# Altium integrated library Altium_PCB_Connector.IntLib: 246 symbols (part 3 of 5)
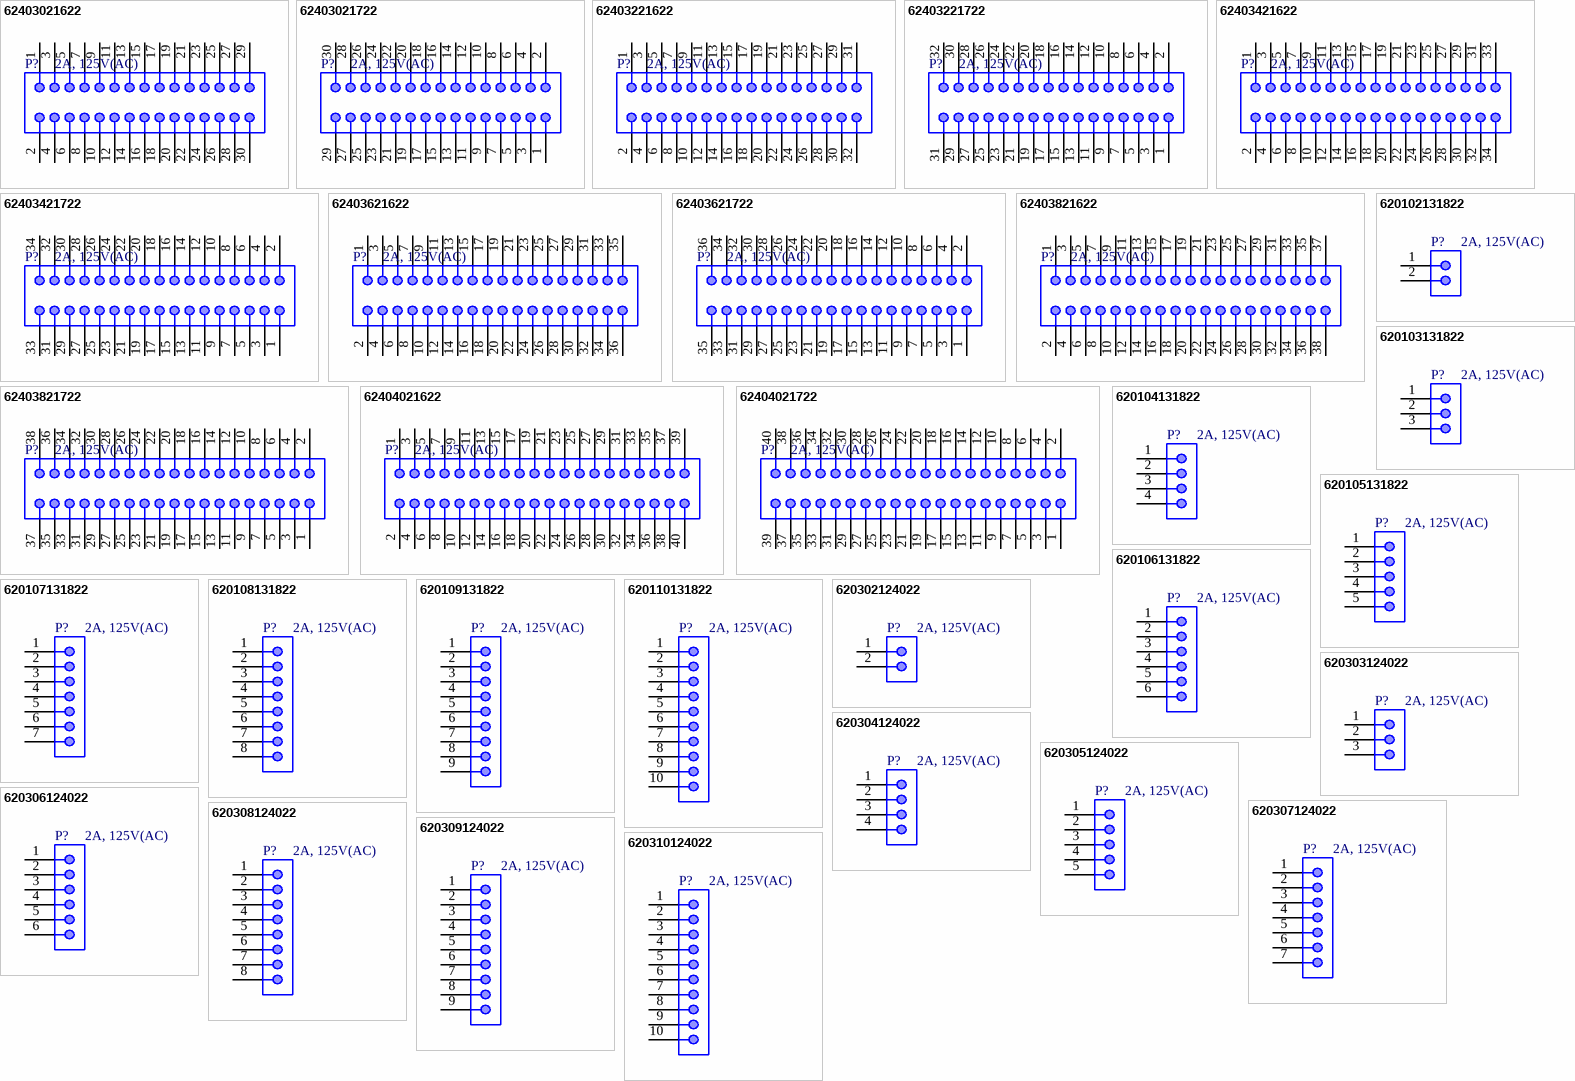
[diagram p11: symbols 62403021622 to 620310124022]

## 62403621622
designator P?, comment 2A, 125V(AC)
WR-WTB THT Male Vertical Shrouded Header with positive locking, Dual Row, pitch 2mm, 36p; Part Number: 62403621622; Manufacturer: Wurth Elektronik; Pin Number: 36; Contact Resistance: 20mOhm; Rated Current: 3A; Withstanding Voltage: 1000VAC; Working Voltage: 250VAC; ComponentLink1Description: Datasheet; ComponentLink1URL: https://www.we-online.com/catalog/datasheet/62403621622.pdf; Pitch: 2mm; Packaging: Tube; Gender: Male; Type: Vertical; Supplier 1 URL: https://www.mouser.vn/ProductDetail/Wurth-Elektronik/62403621622?qs=E2PpAYvlWVvAYw5bAOFHvw%3D%3D; Supplier 2 URL: N/A; Supplier 3 URL: N/A; Value: 2A, 125V(AC); LCSC Part #: N/A; Manufacturer Part Number: 62403621622; Mount: THT; Operating Temperature Max: + 85 C; Operating Temperature Min: - 25 C; Package / Case: 36; Supplier 1: Mouser; Supplier 1 Part Number: 710-62403621622; Supplier 2: Digi-Key; Supplier 2 Part Number: N/A; Supplier 3: thegioiic; Supplier 3 Part Number: N/A
footprint 62403621622
pins: 1, 2, 3, 4, 5, 6, 7, 8, 9, 10, 11, 12, 13, 14, 15, 16, 17, 18, 19, 20, 21, 22, 23, 24, 25, 26, 27, 28, 29, 30, 31, 32, 33, 34, 35, 36

## 62403621722
designator P?, comment 2A, 125V(AC)
WR-WTB THT Male Horizontal Shrouded Header with positive locking, Dual Row, pitch 2mm, 36p; Part Number: 62403621722; Manufacturer: Wurth Elektronik; Pin Number: 36; Contact Resistance: 20mOhm; Rated Current: 3A; Withstanding Voltage: 1000VAC; Working Voltage: 250VAC; ComponentLink1Description: Datasheet; ComponentLink1URL: https://www.we-online.com/catalog/datasheet/62403621722.pdf; Pitch: 2mm; Packaging: Tube; Gender: Male; Type: Horizontal; Supplier 1 URL: https://www.mouser.vn/ProductDetail/Wurth-Elektronik/62403621722?qs=E2PpAYvlWVvIGoKu41xmEw%3D%3D; Supplier 2 URL: N/A; Supplier 3 URL: N/A; Value: 2A, 125V(AC); LCSC Part #: N/A; Manufacturer Part Number: 62403621722; Mount: THT; Operating Temperature Max: + 85 C; Operating Temperature Min: - 25 C; Package / Case: 36; Supplier 1: Mouser; Supplier 1 Part Number: 710-62403621722; Supplier 2: Digi-Key; Supplier 2 Part Number: N/A; Supplier 3: thegioiic; Supplier 3 Part Number: N/A
footprint 62403621722
pins: 1, 2, 3, 4, 5, 6, 7, 8, 9, 10, 11, 12, 13, 14, 15, 16, 17, 18, 19, 20, 21, 22, 23, 24, 25, 26, 27, 28, 29, 30, 31, 32, 33, 34, 35, 36

## 62403821622
designator P?, comment 2A, 125V(AC)
WR-WTB THT Male Vertical Shrouded Header with positive locking, Dual Row, pitch 2mm, 38p; Part Number: 62403821622; Manufacturer: Wurth Elektronik; Pin Number: 38; Contact Resistance: 20mOhm; Rated Current: 3A; Withstanding Voltage: 1000VAC; Working Voltage: 250VAC; ComponentLink1Description: Datasheet; ComponentLink1URL: https://www.we-online.com/catalog/datasheet/62403821622.pdf; Pitch: 2mm; Packaging: Tube; Gender: Male; Type: Vertical; Supplier 1 URL: https://www.mouser.vn/ProductDetail/Wurth-Elektronik/62403821622?qs=E2PpAYvlWVt5WbTSUsixqA%3D%3D; Supplier 2 URL: N/A; Supplier 3 URL: N/A; Value: 2A, 125V(AC); LCSC Part #: N/A; Manufacturer Part Number: 62403821622; Mount: THT; Operating Temperature Max: + 85 C; Operating Temperature Min: - 25 C; Package / Case: 38; Supplier 1: Mouser; Supplier 1 Part Number: 710-62403821622; Supplier 2: Digi-Key; Supplier 2 Part Number: N/A; Supplier 3: thegioiic; Supplier 3 Part Number: N/A
footprint 62403821622
pins: 1, 2, 3, 4, 5, 6, 7, 8, 9, 10, 11, 12, 13, 14, 15, 16, 17, 18, 19, 20, 21, 22, 23, 24, 25, 26, 27, 28, 29, 30, 31, 32, 33, 34, 35, 36, 37, 38

## 62403821722
designator P?, comment 2A, 125V(AC)
WR-WTB THT Male Horizontal Shrouded Header with positive locking, Dual Row, pitch 2mm, 38p; Part Number: 62403821722; Manufacturer: Wurth Elektronik; Pin Number: 38; Contact Resistance: 20mOhm; Rated Current: 3A; Withstanding Voltage: 1000VAC; Working Voltage: 250VAC; ComponentLink1Description: Datasheet; ComponentLink1URL: https://www.we-online.com/catalog/datasheet/62403821722.pdf; Pitch: 2mm; Packaging: Tube; Gender: Male; Type: Horizontal; Supplier 1 URL: https://www.mouser.vn/ProductDetail/Wurth-Elektronik/62403821722?qs=E2PpAYvlWVtfTqKNzPO8Uw%3D%3D; Supplier 2 URL: N/A; Supplier 3 URL: N/A; Value: 2A, 125V(AC); LCSC Part #: N/A; Manufacturer Part Number: 62403821722; Mount: THT; Operating Temperature Max: + 85 C; Operating Temperature Min: - 25 C; Package / Case: 38; Supplier 1: Mouser; Supplier 1 Part Number: 710-62403821722; Supplier 2: Digi-Key; Supplier 2 Part Number: N/A; Supplier 3: thegioiic; Supplier 3 Part Number: N/A
footprint 62403821722
pins: 1, 2, 3, 4, 5, 6, 7, 8, 9, 10, 11, 12, 13, 14, 15, 16, 17, 18, 19, 20, 21, 22, 23, 24, 25, 26, 27, 28, 29, 30, 31, 32, 33, 34, 35, 36, 37, 38

## 62404021622
designator P?, comment 2A, 125V(AC)
WR-WTB THT Male Vertical Shrouded Header with positive locking, Dual Row, pitch 2mm, 40p; Part Number: 62404021622; Manufacturer: Wurth Elektronik; Pin Number: 40; Contact Resistance: 20mOhm; Rated Current: 3A; Withstanding Voltage: 1000VAC; Working Voltage: 250VAC; ComponentLink1Description: Datasheet; ComponentLink1URL: https://www.we-online.com/catalog/datasheet/62404021622.pdf; Pitch: 2mm; Packaging: Tube; Gender: Male; Type: Vertical; Supplier 1 URL: https://www.mouser.vn/ProductDetail/Wurth-Elektronik/62403821622?qs=E2PpAYvlWVt5WbTSUsixqA%3D%3D; Supplier 2 URL: N/A; Supplier 3 URL: N/A; Value: 2A, 125V(AC); LCSC Part #: N/A; Manufacturer Part Number: 62404021622; Mount: THT; Operating Temperature Max: + 85 C; Operating Temperature Min: - 25 C; Package / Case: 40; Supplier 1: Mouser; Supplier 1 Part Number: 710-62403821622; Supplier 2: Digi-Key; Supplier 2 Part Number: N/A; Supplier 3: thegioiic; Supplier 3 Part Number: N/A
footprint 62404021622
pins: 1, 2, 3, 4, 5, 6, 7, 8, 9, 10, 11, 12, 13, 14, 15, 16, 17, 18, 19, 20, 21, 22, 23, 24, 25, 26, 27, 28, 29, 30, 31, 32, 33, 34, 35, 36, 37, 38, 39, 40

## 62404021722
designator P?, comment 2A, 125V(AC)
WR-WTB THT Male Horizontal Shrouded Header with positive locking, Dual Row, pitch 2mm, 40p; Part Number: 62404021722; Manufacturer: Wurth Elektronik; Pin Number: 40; Contact Resistance: 20mOhm; Rated Current: 3A; Withstanding Voltage: 1000VAC; Working Voltage: 250VAC; ComponentLink1Description: Datasheet; ComponentLink1URL: https://www.we-online.com/catalog/datasheet/62404021722.pdf; Pitch: 2mm; Packaging: Tube; Gender: Male; Type: Horizontal; Supplier 1 URL: https://www.mouser.vn/ProductDetail/Wurth-Elektronik/62404021722?qs=E2PpAYvlWVu8c5h%2F6qYDyA%3D%3D; Supplier 2 URL: N/A; Supplier 3 URL: N/A; Value: 2A, 125V(AC); LCSC Part #: N/A; Manufacturer Part Number: 62404021722; Mount: THT; Operating Temperature Max: + 85 C; Operating Temperature Min: - 25 C; Package / Case: 40; Supplier 1: Mouser; Supplier 1 Part Number: 710-62404021722; Supplier 2: Digi-Key; Supplier 2 Part Number: N/A; Supplier 3: thegioiic; Supplier 3 Part Number: N/A
footprint 62404021722
pins: 1, 2, 3, 4, 5, 6, 7, 8, 9, 10, 11, 12, 13, 14, 15, 16, 17, 18, 19, 20, 21, 22, 23, 24, 25, 26, 27, 28, 29, 30, 31, 32, 33, 34, 35, 36, 37, 38, 39, 40

## 620102131822
designator P?, comment 2A, 125V(AC)
WR-WTB SMT Male Horizontal Shrouded Header, pitch 2mm, 2p; Part Number: 620102131822; Manufacturer: Wurth Elektronik; Pin Number: 2; Contact Resistance: 20mOhm; Withstanding Voltage: 800VAC; Working Voltage: 100VAC; ComponentLink1Description: Datasheet; ComponentLink1URL: https://www.we-online.com/catalog/datasheet/620102131822.pdf; Pitch: 2mm; Packaging: Tape and Reel; Gender: Male; Type: Horizontal; Rated Current: 2A; Supplier 1 URL: https://www.mouser.vn/ProductDetail/Wurth-Elektronik/620102131822?qs=ZtY9WdtwX54K2dkLvxjzuQ%3D%3D; Supplier 2 URL: N/A; Supplier 3 URL: https://www.thegioiic.com/dau-ph-2-0mm-2-chan-dan-smd-nam-ngang; Value: 2A, 125V(AC); LCSC Part #: N/A; Manufacturer Part Number: 620102131822; Mount: SMD/SMT; Operating Temperature Max: + 85 C; Operating Temperature Min: - 25 C; Package / Case: 2; Supplier 1: Mouser; Supplier 1 Part Number: 710-620102131822; Supplier 2: Digi-Key; Supplier 2 Part Number: N/A; Supplier 3: thegioiic; Supplier 3 Part Number: N/A
footprint 620102131822
pins: 1, 2

## 620103131822
designator P?, comment 2A, 125V(AC)
WR-WTB SMT Male Horizontal Shrouded Header, pitch 2mm, 3p; Part Number: 620103131822; Manufacturer: Wurth Elektronik; Pin Number: 3; Contact Resistance: 20mOhm; Withstanding Voltage: 800VAC; Working Voltage: 100VAC; ComponentLink1Description: Datasheet; ComponentLink1URL: https://www.we-online.com/catalog/datasheet/620103131822.pdf; Pitch: 2mm; Packaging: Tape and Reel; Gender: Male; Type: Horizontal; Rated Current: 2A; Supplier 1 URL: https://www.mouser.vn/ProductDetail/Wurth-Elektronik/620103131822?qs=ZtY9WdtwX54jBicvPVEzcw%3D%3D; Supplier 2 URL: N/A; Supplier 3 URL: https://www.thegioiic.com/dau-ph-2-0mm-3-chan-dan-smd-nam-ngang; Value: 2A, 125V(AC); LCSC Part #: N/A; Manufacturer Part Number: 620103131822; Mount: SMD/SMT; Operating Temperature Max: + 85 C; Operating Temperature Min: - 25 C; Package / Case: 3; Supplier 1: Mouser; Supplier 1 Part Number: 710-620103131822; Supplier 2: Digi-Key; Supplier 2 Part Number: N/A; Supplier 3: thegioiic; Supplier 3 Part Number: N/A
footprint 620103131822
pins: 1, 2, 3

## 620104131822
designator P?, comment 2A, 125V(AC)
WR-WTB SMT Male Horizontal Shrouded Header, pitch 2mm, 4p; Part Number: 620104131822; Manufacturer: Wurth Elektronik; Pin Number: 4; Contact Resistance: 20mOhm; Withstanding Voltage: 800VAC; Working Voltage: 100VAC; ComponentLink1Description: Datasheet; ComponentLink1URL: https://www.we-online.com/catalog/datasheet/620104131822.pdf; Pitch: 2mm; Packaging: Tape and Reel; Gender: Male; Type: Horizontal; Rated Current: 2A; Supplier 1 URL: https://www.mouser.vn/ProductDetail/Wurth-Elektronik/620104131822?qs=ZtY9WdtwX57A7D%2FbILyVEQ%3D%3D; Supplier 2 URL: N/A; Supplier 3 URL: https://www.thegioiic.com/dau-ph-2-0mm-4-chan-dan-smd-nam-ngang; Value: 2A, 125V(AC); LCSC Part #: N/A; Manufacturer Part Number: 620104131822; Mount: SMD/SMT; Operating Temperature Max: + 85 C; Operating Temperature Min: - 25 C; Package / Case: 4; Supplier 1: Mouser; Supplier 1 Part Number: 710-620104131822; Supplier 2: Digi-Key; Supplier 2 Part Number: N/A; Supplier 3: thegioiic; Supplier 3 Part Number: N/A
footprint 620104131822
pins: 1, 2, 3, 4

## 620105131822
designator P?, comment 2A, 125V(AC)
WR-WTB SMT Male Horizontal Shrouded Header, pitch 2mm, 5p; Part Number: 620105131822; Manufacturer: Wurth Elektronik; Pin Number: 5; Contact Resistance: 20mOhm; Withstanding Voltage: 800VAC; Working Voltage: 100VAC; ComponentLink1Description: Datasheet; ComponentLink1URL: https://www.we-online.com/catalog/datasheet/620105131822.pdf; Pitch: 2mm; Packaging: Tape and Reel; Gender: Male; Type: Horizontal; Rated Current: 2A; Supplier 1 URL: https://www.mouser.vn/ProductDetail/Wurth-Elektronik/620105131822?qs=ZtY9WdtwX54F%2Fgkpjaf7GA%3D%3D; Supplier 2 URL: N/A; Supplier 3 URL: https://www.thegioiic.com/dau-ph-2-0mm-5-chan-dan-smd-nam-ngang; Value: 2A, 125V(AC); LCSC Part #: N/A; Manufacturer Part Number: 620105131822; Mount: SMD/SMT; Operating Temperature Max: + 85 C; Operating Temperature Min: - 25 C; Package / Case: 5; Supplier 1: Mouser; Supplier 1 Part Number: 710-620105131822; Supplier 2: Digi-Key; Supplier 2 Part Number: N/A; Supplier 3: thegioiic; Supplier 3 Part Number: N/A
footprint 620105131822
pins: 1, 2, 3, 4, 5

## 620106131822
designator P?, comment 2A, 125V(AC)
WR-WTB SMT Male Horizontal Shrouded Header, pitch 2mm, 6p; Part Number: 620106131822; Manufacturer: Wurth Elektronik; Pin Number: 6; Contact Resistance: 20mOhm; Withstanding Voltage: 800VAC; Working Voltage: 100VAC; ComponentLink1Description: Datasheet; ComponentLink1URL: https://www.we-online.com/catalog/datasheet/620106131822.pdf; Pitch: 2mm; Packaging: Tape and Reel; Gender: Male; Type: Horizontal; Rated Current: 2A; Supplier 1 URL: N/A; Supplier 2 URL: N/A; Supplier 3 URL: https://www.thegioiic.com/dau-ph-2-0mm-6-chan-dan-smd-nam-ngang; Value: 2A, 125V(AC); LCSC Part #: N/A; Manufacturer Part Number: 620106131822; Mount: SMD/SMT; Operating Temperature Max: + 85 C; Operating Temperature Min: - 25 C; Package / Case: 6; Supplier 1: Mouser; Supplier 1 Part Number: N/A; Supplier 2: Digi-Key; Supplier 2 Part Number: N/A; Supplier 3: thegioiic; Supplier 3 Part Number: N/A
footprint 620106131822
pins: 1, 2, 3, 4, 5, 6

## 620107131822
designator P?, comment 2A, 125V(AC)
WR-WTB SMT Male Horizontal Shrouded Header, pitch 2mm, 7p; Part Number: 620107131822; Manufacturer: Wurth Elektronik; Pin Number: 7; Contact Resistance: 20mOhm; Withstanding Voltage: 800VAC; Working Voltage: 100VAC; ComponentLink1Description: Datasheet; ComponentLink1URL: https://www.we-online.com/catalog/datasheet/620107131822.pdf; Pitch: 2mm; Packaging: Tape and Reel; Gender: Male; Type: Horizontal; Rated Current: 2A; Supplier 1 URL: N/A; Supplier 2 URL: N/A; Supplier 3 URL: https://www.thegioiic.com/dau-ph-2-0mm-7-chan-dan-smd-nam-ngang; Value: 2A, 125V(AC); LCSC Part #: N/A; Manufacturer Part Number: 620107131822; Mount: SMD/SMT; Operating Temperature Max: + 85 C; Operating Temperature Min: - 25 C; Package / Case: 7; Supplier 1: Mouser; Supplier 1 Part Number: N/A; Supplier 2: Digi-Key; Supplier 2 Part Number: N/A; Supplier 3: thegioiic; Supplier 3 Part Number: N/A
footprint 620107131822
pins: 1, 2, 3, 4, 5, 6, 7

## 620108131822
designator P?, comment 2A, 125V(AC)
WR-WTB SMT Male Horizontal Shrouded Header, pitch 2mm, 8p; Part Number: 620108131822; Manufacturer: Wurth Elektronik; Pin Number: 8; Contact Resistance: 20mOhm; Withstanding Voltage: 800VAC; Working Voltage: 100VAC; ComponentLink1Description: Datasheet; ComponentLink1URL: https://www.we-online.com/catalog/datasheet/620108131822.pdf; Pitch: 2mm; Packaging: Tape and Reel; Gender: Male; Type: Horizontal; Rated Current: 2A; Supplier 1 URL: N/A; Supplier 2 URL: N/A; Supplier 3 URL: https://www.thegioiic.com/dau-ph-2-0mm-8-chan-dan-smd-nam-ngang; Value: 2A, 125V(AC); LCSC Part #: N/A; Manufacturer Part Number: 620108131822; Mount: SMD/SMT; Operating Temperature Max: + 85 C; Operating Temperature Min: - 25 C; Package / Case: 8; Supplier 1: Mouser; Supplier 1 Part Number: N/A; Supplier 2: Digi-Key; Supplier 2 Part Number: N/A; Supplier 3: thegioiic; Supplier 3 Part Number: N/A
footprint 620108131822
pins: 1, 2, 3, 4, 5, 6, 7, 8

## 620109131822
designator P?, comment 2A, 125V(AC)
WR-WTB SMT Male Horizontal Shrouded Header, pitch 2mm, 9p; Part Number: 620109131822; Manufacturer: Wurth Elektronik; Pin Number: 9; Contact Resistance: 20mOhm; Withstanding Voltage: 800VAC; Working Voltage: 100VAC; ComponentLink1Description: Datasheet; ComponentLink1URL: https://www.we-online.com/catalog/datasheet/620109131822.pdf; Pitch: 2mm; Packaging: Tape and Reel; Gender: Male; Type: Horizontal; Rated Current: 2A; Supplier 1 URL: N/A; Supplier 2 URL: N/A; Supplier 3 URL: https://www.thegioiic.com/dau-ph-2-0mm-9-chan-dan-smd-nam-ngang; Value: 2A, 125V(AC); LCSC Part #: N/A; Manufacturer Part Number: 620109131822; Mount: SMD/SMT; Operating Temperature Max: + 85 C; Operating Temperature Min: - 25 C; Package / Case: 9; Supplier 1: Mouser; Supplier 1 Part Number: N/A; Supplier 2: Digi-Key; Supplier 2 Part Number: N/A; Supplier 3: thegioiic; Supplier 3 Part Number: N/A
footprint 620109131822
pins: 1, 2, 3, 4, 5, 6, 7, 8, 9

## 620110131822
designator P?, comment 2A, 125V(AC)
WR-WTB SMT Male Horizontal Shrouded Header, pitch 2mm, 10p; Part Number: 620110131822; Manufacturer: Wurth Elektronik; Pin Number: 10; Contact Resistance: 20mOhm; Withstanding Voltage: 800VAC; Working Voltage: 100VAC; ComponentLink1Description: Datasheet; ComponentLink1URL: https://www.we-online.com/catalog/datasheet/620110131822.pdf; Pitch: 2mm; Packaging: Tape and Reel; Gender: Male; Type: Horizontal; Rated Current: 2A; Supplier 1 URL: N/A; Supplier 2 URL: N/A; Supplier 3 URL: https://www.thegioiic.com/dau-ph-2-0mm-10-chan-dan-smd-nam-ngang; Value: 2A, 125V(AC); LCSC Part #: N/A; Manufacturer Part Number: 620110131822; Mount: SMD/SMT; Operating Temperature Max: + 85 C; Operating Temperature Min: - 25 C; Package / Case: 10; Supplier 1: Mouser; Supplier 1 Part Number: N/A; Supplier 2: Digi-Key; Supplier 2 Part Number: N/A; Supplier 3: thegioiic; Supplier 3 Part Number: N/A
footprint 620110131822
pins: 1, 2, 3, 4, 5, 6, 7, 8, 9, 10

## 620302124022
designator P?, comment 2A, 125V(AC)
WR-WTB SMT Male Vertical Shrouded Header, pitch 2mm, 2p; Part Number: 620302124022; Manufacturer: Wurth Elektronik; Pin Number: 2; Contact Resistance: 20mOhm; Withstanding Voltage: 800VAC; Working Voltage: 100VAC; ComponentLink1Description: Datasheet; ComponentLink1URL: https://www.we-online.com/catalog/datasheet/620302124022.pdf; Pitch: 2mm; Packaging: Tape and Reel; Gender: Male; Type: Vertical; Rated Current: 2A; Supplier 1 URL: https://www.mouser.vn/ProductDetail/Wurth-Elektronik/620302124022?qs=ZtY9WdtwX56bKCHoSxh6%252Bg%3D%3D; Supplier 2 URL: N/A; Supplier 3 URL: N/A; Value: 2A, 125V(AC); LCSC Part #: N/A; Manufacturer Part Number: 620302124022; Mount: SMD/SMT; Operating Temperature Max: + 85 C; Operating Temperature Min: - 25 C; Package / Case: 2; Supplier 1: Mouser; Supplier 1 Part Number: 710-620302124022; Supplier 2: Digi-Key; Supplier 2 Part Number: N/A; Supplier 3: thegioiic; Supplier 3 Part Number: N/A
footprint 620302124022
pins: 1, 2

## 620303124022
designator P?, comment 2A, 125V(AC)
WR-WTB SMT Male Vertical Shrouded Header, pitch 2mm, 3p; Part Number: 620303124022; Manufacturer: Wurth Elektronik; Pin Number: 3; Contact Resistance: 20mOhm; Withstanding Voltage: 800VAC; Working Voltage: 100VAC; ComponentLink1Description: Datasheet; ComponentLink1URL: https://www.we-online.com/catalog/datasheet/620303124022.pdf; Pitch: 2mm; Packaging: Tape and Reel; Gender: Male; Type: Vertical; Rated Current: 2A; Supplier 1 URL: https://www.mouser.vn/ProductDetail/Wurth-Elektronik/620303124022?qs=ZtY9WdtwX56nfsQQN0YNwg%3D%3D; Supplier 2 URL: N/A; Supplier 3 URL: N/A; Value: 2A, 125V(AC); LCSC Part #: N/A; Manufacturer Part Number: 620303124022; Mount: SMD/SMT; Operating Temperature Max: + 85 C; Operating Temperature Min: - 25 C; Package / Case: 3; Supplier 1: Mouser; Supplier 1 Part Number: 710-620303124022; Supplier 2: Digi-Key; Supplier 2 Part Number: N/A; Supplier 3: thegioiic; Supplier 3 Part Number: N/A
footprint 620303124022
pins: 1, 2, 3

## 620304124022
designator P?, comment 2A, 125V(AC)
WR-WTB SMT Male Vertical Shrouded Header, pitch 2mm, 4p; Part Number: 620304124022; Manufacturer: Wurth Elektronik; Pin Number: 4; Contact Resistance: 20mOhm; Withstanding Voltage: 800VAC; Working Voltage: 100VAC; ComponentLink1Description: Datasheet; ComponentLink1URL: https://www.we-online.com/catalog/datasheet/620304124022.pdf; Pitch: 2mm; Packaging: Tape and Reel; Gender: Male; Type: Vertical; Rated Current: 2A; Supplier 1 URL: https://www.mouser.vn/ProductDetail/Wurth-Elektronik/620304124022?qs=ZtY9WdtwX5729BhN8GzI6w%3D%3D; Supplier 2 URL: N/A; Supplier 3 URL: N/A; Value: 2A, 125V(AC); LCSC Part #: N/A; Manufacturer Part Number: 620304124022; Mount: SMD/SMT; Operating Temperature Max: + 85 C; Operating Temperature Min: - 25 C; Package / Case: 4; Supplier 1: Mouser; Supplier 1 Part Number: 710-620304124022; Supplier 2: Digi-Key; Supplier 2 Part Number: N/A; Supplier 3: thegioiic; Supplier 3 Part Number: N/A
footprint 620304124022
pins: 1, 2, 3, 4

## 620305124022
designator P?, comment 2A, 125V(AC)
WR-WTB SMT Male Vertical Shrouded Header, pitch 2mm, 5p; Part Number: 620305124022; Manufacturer: Wurth Elektronik; Pin Number: 5; Contact Resistance: 20mOhm; Withstanding Voltage: 800VAC; Working Voltage: 100VAC; ComponentLink1Description: Datasheet; ComponentLink1URL: https://www.we-online.com/catalog/datasheet/620305124022.pdf; Pitch: 2mm; Packaging: Tape and Reel; Gender: Male; Type: Vertical; Rated Current: 2A; Supplier 1 URL: https://www.mouser.vn/ProductDetail/Wurth-Elektronik/620305124022?qs=ZtY9WdtwX57L3DNzMAlKTg%3D%3D; Supplier 2 URL: N/A; Supplier 3 URL: N/A; Value: 2A, 125V(AC); LCSC Part #: N/A; Manufacturer Part Number: 620305124022; Mount: SMD/SMT; Operating Temperature Max: + 85 C; Operating Temperature Min: - 25 C; Package / Case: 5; Supplier 1: Mouser; Supplier 1 Part Number: 710-620305124022; Supplier 2: Digi-Key; Supplier 2 Part Number: N/A; Supplier 3: thegioiic; Supplier 3 Part Number: N/A
footprint 620305124022
pins: 1, 2, 3, 4, 5

## 620306124022
designator P?, comment 2A, 125V(AC)
WR-WTB SMT Male Vertical Shrouded Header, pitch 2mm, 6p; Part Number: 620306124022; Manufacturer: Wurth Elektronik; Pin Number: 6; Contact Resistance: 20mOhm; Withstanding Voltage: 800VAC; Working Voltage: 100VAC; ComponentLink1Description: Datasheet; ComponentLink1URL: https://www.we-online.com/catalog/datasheet/620306124022.pdf; Pitch: 2mm; Packaging: Tape and Reel; Gender: Male; Type: Vertical; Rated Current: 2A; Supplier 1 URL: N/A; Supplier 2 URL: N/A; Supplier 3 URL: N/A; Value: 2A, 125V(AC); LCSC Part #: N/A; Manufacturer Part Number: 620306124022; Mount: SMD/SMT; Operating Temperature Max: + 85 C; Operating Temperature Min: - 25 C; Package / Case: 6; Supplier 1: Mouser; Supplier 1 Part Number: N/A; Supplier 2: Digi-Key; Supplier 2 Part Number: N/A; Supplier 3: thegioiic; Supplier 3 Part Number: N/A
footprint 620306124022
pins: 1, 2, 3, 4, 5, 6

## 620307124022
designator P?, comment 2A, 125V(AC)
WR-WTB SMT Male Vertical Shrouded Header, pitch 2mm, 7p; Part Number: 620307124022; Manufacturer: Wurth Elektronik; Pin Number: 7; Contact Resistance: 20mOhm; Withstanding Voltage: 800VAC; Working Voltage: 100VAC; ComponentLink1Description: Datasheet; ComponentLink1URL: https://www.we-online.com/catalog/datasheet/620307124022.pdf; Pitch: 2mm; Packaging: Tape and Reel; Gender: Male; Type: Vertical; Rated Current: 2A; Supplier 1 URL: N/A; Supplier 2 URL: N/A; Supplier 3 URL: N/A; Value: 2A, 125V(AC); LCSC Part #: N/A; Manufacturer Part Number: 620307124022; Mount: SMD/SMT; Operating Temperature Max: + 85 C; Operating Temperature Min: - 25 C; Package / Case: 7; Supplier 1: Mouser; Supplier 1 Part Number: N/A; Supplier 2: Digi-Key; Supplier 2 Part Number: N/A; Supplier 3: thegioiic; Supplier 3 Part Number: N/A
footprint 620307124022
pins: 1, 2, 3, 4, 5, 6, 7

## 620308124022
designator P?, comment 2A, 125V(AC)
WR-WTB SMT Male Vertical Shrouded Header, pitch 2mm, 8p; Part Number: 620308124022; Manufacturer: Wurth Elektronik; Pin Number: 8; Contact Resistance: 20mOhm; Withstanding Voltage: 800VAC; Working Voltage: 100VAC; ComponentLink1Description: Datasheet; ComponentLink1URL: https://www.we-online.com/catalog/datasheet/620308124022.pdf; Pitch: 2mm; Packaging: Tape and Reel; Gender: Male; Type: Vertical; Rated Current: 2A; Supplier 1 URL: N/A; Supplier 2 URL: N/A; Supplier 3 URL: N/A; Value: 2A, 125V(AC); LCSC Part #: N/A; Manufacturer Part Number: 620308124022; Mount: SMD/SMT; Operating Temperature Max: + 85 C; Operating Temperature Min: - 25 C; Package / Case: 8; Supplier 1: Mouser; Supplier 1 Part Number: N/A; Supplier 2: Digi-Key; Supplier 2 Part Number: N/A; Supplier 3: thegioiic; Supplier 3 Part Number: N/A
footprint 620308124022
pins: 1, 2, 3, 4, 5, 6, 7, 8

## 620309124022
designator P?, comment 2A, 125V(AC)
WR-WTB SMT Male Vertical Shrouded Header, pitch 2mm, 9p; Part Number: 620309124022; Manufacturer: Wurth Elektronik; Pin Number: 9; Contact Resistance: 20mOhm; Withstanding Voltage: 800VAC; Working Voltage: 100VAC; ComponentLink1Description: Datasheet; ComponentLink1URL: https://www.we-online.com/catalog/datasheet/620309124022.pdf; Pitch: 2mm; Packaging: Tape and Reel; Gender: Male; Type: Vertical; Rated Current: 2A; Supplier 1 URL: N/A; Supplier 2 URL: N/A; Supplier 3 URL: N/A; Value: 2A, 125V(AC); LCSC Part #: N/A; Manufacturer Part Number: 620309124022; Mount: SMD/SMT; Operating Temperature Max: + 85 C; Operating Temperature Min: - 25 C; Package / Case: 9; Supplier 1: Mouser; Supplier 1 Part Number: N/A; Supplier 2: Digi-Key; Supplier 2 Part Number: N/A; Supplier 3: thegioiic; Supplier 3 Part Number: N/A
footprint 620309124022
pins: 1, 2, 3, 4, 5, 6, 7, 8, 9

## 620310124022
designator P?, comment 2A, 125V(AC)
WR-WTB SMT Male Vertical Shrouded Header, pitch 2mm, 10p; Part Number: 620310124022; Manufacturer: Wurth Elektronik; Pin Number: 10; Contact Resistance: 20mOhm; Withstanding Voltage: 800VAC; Working Voltage: 100VAC; ComponentLink1Description: Datasheet; ComponentLink1URL: https://www.we-online.com/catalog/datasheet/620310124022.pdf; Pitch: 2mm; Packaging: Tape and Reel; Gender: Male; Type: Vertical; Rated Current: 2A; Supplier 1 URL: N/A; Supplier 2 URL: N/A; Supplier 3 URL: N/A; Value: 2A, 125V(AC); LCSC Part #: N/A; Manufacturer Part Number: 620310124022; Mount: SMD/SMT; Operating Temperature Max: + 85 C; Operating Temperature Min: - 25 C; Package / Case: 10; Supplier 1: Mouser; Supplier 1 Part Number: N/A; Supplier 2: Digi-Key; Supplier 2 Part Number: N/A; Supplier 3: thegioiic; Supplier 3 Part Number: N/A
footprint 620310124022
pins: 1, 2, 3, 4, 5, 6, 7, 8, 9, 10


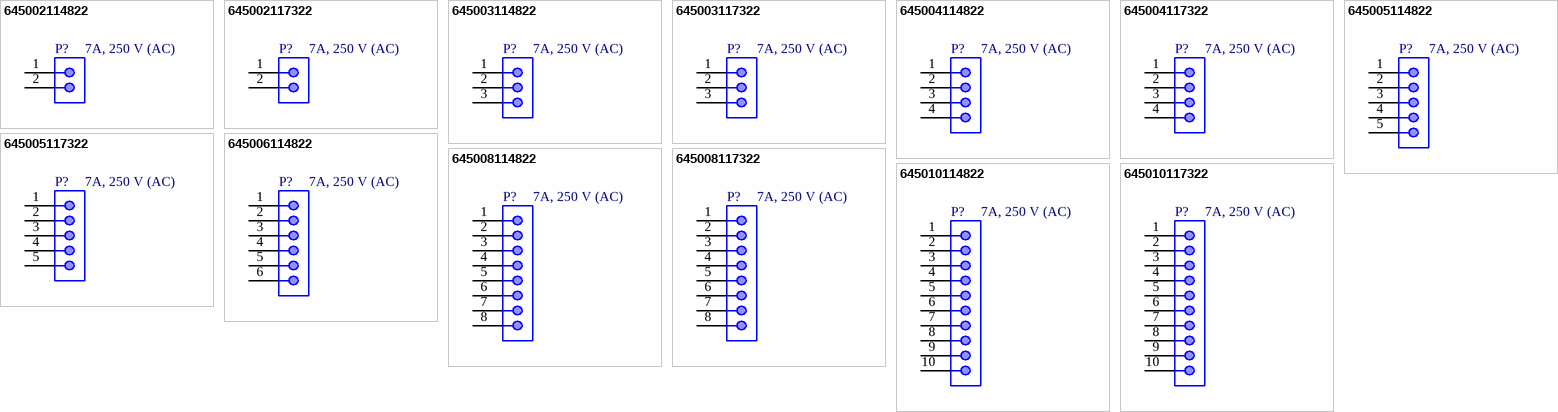
[diagram p4: symbols 645002114822 to 645010117322]

## 645002114822
designator P?, comment 7A, 250 V (AC)
WR-WTB THT Male Vertical Locking Header, pitch 3.96mm, 2p; Manufacturer: Wurth Elektronik; Manufacturer Part Number: 645002114822; Pin Number: 2; Contact Resistance: 20mOhm; Withstanding Voltage: 1500VAC; Working Voltage: 250VAC; ComponentLink1Description: Datasheet; ComponentLink1URL: https://www.we-online.com/catalog/datasheet/645002114822.pdf; Pitch: 3.96mm; Packaging: Bag; Gender: Male; Type: Vertical; Rated Current: 7A; Value: 7A, 250 V (AC); Supplier 1 URL: N/A; Supplier 2 URL: N/A; Supplier 3 URL: N/A; LCSC Part #: N/A; Mount: THT; Operating Temperature Max: + 105 C; Operating Temperature Min: - 40 C; Package / Case: 2; Supplier 1: Mouser; Supplier 1 Part Number: N/A; Supplier 2: Digi-Key; Supplier 2 Part Number: N/A; Supplier 3: thegioiic; Supplier 3 Part Number: N/A
footprint 645002114822
pins: 1, 2

## 645002117322
designator P?, comment 7A, 250 V (AC)
WR-WTB THT Male Right Angled Locking Header, pitch 3.96mm, 2p; Manufacturer: Wurth Elektronik; Manufacturer Part Number: 645002117322; Pin Number: 2; Contact Resistance: 20mOhm; Withstanding Voltage: 1500VAC; Working Voltage: 250VAC; ComponentLink1Description: Datasheet; ComponentLink1URL: https://www.we-online.com/catalog/datasheet/645002117322.pdf; Pitch: 3.96mm; Packaging: Bag; Gender: Male; Type: Right Angled; Rated Current: 7A; Value: 7A, 250 V (AC); Supplier 1 URL: N/A; Supplier 2 URL: N/A; Supplier 3 URL: N/A; LCSC Part #: N/A; Mount: THT; Operating Temperature Max: + 105 C; Operating Temperature Min: - 40 C; Package / Case: 2; Supplier 1: Mouser; Supplier 1 Part Number: N/A; Supplier 2: Digi-Key; Supplier 2 Part Number: N/A; Supplier 3: thegioiic; Supplier 3 Part Number: N/A
footprint 645002117322
pins: 1, 2

## 645003114822
designator P?, comment 7A, 250 V (AC)
WR-WTB THT Male Vertical Locking Header, pitch 3.96mm, 3p; Manufacturer: Wurth Elektronik; Manufacturer Part Number: 645003114822; Pin Number: 3; Contact Resistance: 20mOhm; Withstanding Voltage: 1500VAC; Working Voltage: 250VAC; ComponentLink1Description: Datasheet; ComponentLink1URL: https://www.we-online.com/catalog/datasheet/645003114822.pdf; Pitch: 3.96mm; Packaging: Bag; Gender: Male; Type: Vertical; Rated Current: 7A; Value: 7A, 250 V (AC); Supplier 1 URL: N/A; Supplier 2 URL: N/A; Supplier 3 URL: N/A; LCSC Part #: N/A; Mount: THT; Operating Temperature Max: + 105 C; Operating Temperature Min: - 40 C; Package / Case: 3; Supplier 1: Mouser; Supplier 1 Part Number: N/A; Supplier 2: Digi-Key; Supplier 2 Part Number: N/A; Supplier 3: thegioiic; Supplier 3 Part Number: N/A
footprint 645003114822
pins: 1, 2, 3

## 645003117322
designator P?, comment 7A, 250 V (AC)
WR-WTB THT Male Right Angled Locking Header, pitch 3.96mm, 3p; Manufacturer: Wurth Elektronik; Manufacturer Part Number: 645003117322; Pin Number: 3; Contact Resistance: 20mOhm; Withstanding Voltage: 1500VAC; Working Voltage: 250VAC; ComponentLink1Description: Datasheet; ComponentLink1URL: https://www.we-online.com/catalog/datasheet/645003117322.pdf; Pitch: 3.96mm; Packaging: Bag; Gender: Male; Type: Right Angled; Rated Current: 7A; Value: 7A, 250 V (AC); Supplier 1 URL: N/A; Supplier 2 URL: N/A; Supplier 3 URL: N/A; LCSC Part #: N/A; Mount: THT; Operating Temperature Max: + 105 C; Operating Temperature Min: - 40 C; Package / Case: 3; Supplier 1: Mouser; Supplier 1 Part Number: N/A; Supplier 2: Digi-Key; Supplier 2 Part Number: N/A; Supplier 3: thegioiic; Supplier 3 Part Number: N/A
footprint 645003117322
pins: 1, 2, 3

## 645004114822
designator P?, comment 7A, 250 V (AC)
WR-WTB THT Male Vertical Locking Header, pitch 3.96mm, 4p; Manufacturer: Wurth Elektronik; Manufacturer Part Number: 645004114822; Pin Number: 4; Contact Resistance: 20mOhm; Withstanding Voltage: 1500VAC; Working Voltage: 250VAC; ComponentLink1Description: Datasheet; ComponentLink1URL: https://www.we-online.com/catalog/datasheet/645004114822.pdf; Pitch: 3.96mm; Packaging: Bag; Gender: Male; Type: Vertical; Rated Current: 7A; Value: 7A, 250 V (AC); Supplier 1 URL: N/A; Supplier 2 URL: N/A; Supplier 3 URL: N/A; LCSC Part #: N/A; Mount: THT; Operating Temperature Max: + 105 C; Operating Temperature Min: - 40 C; Package / Case: 4; Supplier 1: Mouser; Supplier 1 Part Number: N/A; Supplier 2: Digi-Key; Supplier 2 Part Number: N/A; Supplier 3: thegioiic; Supplier 3 Part Number: N/A
footprint 645004114822
pins: 1, 2, 3, 4

## 645004117322
designator P?, comment 7A, 250 V (AC)
WR-WTB THT Male Right Angled Locking Header, pitch 3.96mm, 4p; Manufacturer: Wurth Elektronik; Manufacturer Part Number: 645004117322; Pin Number: 4; Contact Resistance: 20mOhm; Withstanding Voltage: 1500VAC; Working Voltage: 250VAC; ComponentLink1Description: Datasheet; ComponentLink1URL: https://www.we-online.com/catalog/datasheet/645004117322.pdf; Pitch: 3.96mm; Packaging: Bag; Gender: Male; Type: Right Angled; Rated Current: 7A; Value: 7A, 250 V (AC); Supplier 1 URL: N/A; Supplier 2 URL: N/A; Supplier 3 URL: N/A; LCSC Part #: N/A; Mount: THT; Operating Temperature Max: + 105 C; Operating Temperature Min: - 40 C; Package / Case: 4; Supplier 1: Mouser; Supplier 1 Part Number: N/A; Supplier 2: Digi-Key; Supplier 2 Part Number: N/A; Supplier 3: thegioiic; Supplier 3 Part Number: N/A
footprint 645004117322
pins: 1, 2, 3, 4

## 645005114822
designator P?, comment 7A, 250 V (AC)
WR-WTB THT Male Vertical Locking Header, pitch 3.96mm, 5p; Manufacturer: Wurth Elektronik; Manufacturer Part Number: 645005114822; Pin Number: 5; Contact Resistance: 20mOhm; Withstanding Voltage: 1500VAC; Working Voltage: 250VAC; ComponentLink1Description: Datasheet; ComponentLink1URL: https://www.we-online.com/catalog/datasheet/645005114822.pdf; Pitch: 3.96mm; Packaging: Bag; Gender: Male; Type: Vertical; Rated Current: 7A; Value: 7A, 250 V (AC); Supplier 1 URL: N/A; Supplier 2 URL: N/A; Supplier 3 URL: N/A; LCSC Part #: N/A; Mount: THT; Operating Temperature Max: + 105 C; Operating Temperature Min: - 40 C; Package / Case: 5; Supplier 1: Mouser; Supplier 1 Part Number: N/A; Supplier 2: Digi-Key; Supplier 2 Part Number: N/A; Supplier 3: thegioiic; Supplier 3 Part Number: N/A
footprint 645005114822
pins: 1, 2, 3, 4, 5

## 645005117322
designator P?, comment 7A, 250 V (AC)
WR-WTB THT Male Right Angled Locking Header, pitch 3.96mm, 5p; Manufacturer: Wurth Elektronik; Manufacturer Part Number: 645005117322; Pin Number: 5; Contact Resistance: 20mOhm; Withstanding Voltage: 1500VAC; Working Voltage: 250VAC; ComponentLink1Description: Datasheet; ComponentLink1URL: https://www.we-online.com/catalog/datasheet/645005117322.pdf; Pitch: 3.96mm; Packaging: Bag; Gender: Male; Type: Right Angled; Rated Current: 7A; Value: 7A, 250 V (AC); Supplier 1 URL: N/A; Supplier 2 URL: N/A; Supplier 3 URL: N/A; LCSC Part #: N/A; Mount: THT; Operating Temperature Max: + 105 C; Operating Temperature Min: - 40 C; Package / Case: 5; Supplier 1: Mouser; Supplier 1 Part Number: N/A; Supplier 2: Digi-Key; Supplier 2 Part Number: N/A; Supplier 3: thegioiic; Supplier 3 Part Number: N/A
footprint 645005117322
pins: 1, 2, 3, 4, 5

## 645006114822
designator P?, comment 7A, 250 V (AC)
WR-WTB THT Male Vertical Locking Header, pitch 3.96mm, 6p; Manufacturer: Wurth Elektronik; Manufacturer Part Number: 645006114822; Pin Number: 6; Contact Resistance: 20mOhm; Withstanding Voltage: 1500VAC; Working Voltage: 250VAC; ComponentLink1Description: Datasheet; ComponentLink1URL: https://www.we-online.com/catalog/datasheet/645006114822.pdf; Pitch: 3.96mm; Packaging: Bag; Gender: Male; Type: Vertical; Rated Current: 7A; Value: 7A, 250 V (AC); Supplier 1 URL: N/A; Supplier 2 URL: N/A; Supplier 3 URL: N/A; LCSC Part #: N/A; Mount: THT; Operating Temperature Max: + 105 C; Operating Temperature Min: - 40 C; Package / Case: 6; Supplier 1: Mouser; Supplier 1 Part Number: N/A; Supplier 2: Digi-Key; Supplier 2 Part Number: N/A; Supplier 3: thegioiic; Supplier 3 Part Number: N/A
footprint 645006114822
pins: 1, 2, 3, 4, 5, 6

## 645008114822
designator P?, comment 7A, 250 V (AC)
WR-WTB THT Male Vertical Locking Header, pitch 3.96mm, 8p; Manufacturer: Wurth Elektronik; Manufacturer Part Number: 645008114822; Pin Number: 8; Contact Resistance: 20mOhm; Withstanding Voltage: 1500VAC; Working Voltage: 250VAC; ComponentLink1Description: Datasheet; ComponentLink1URL: https://www.we-online.com/catalog/datasheet/645008114822.pdf; Pitch: 3.96mm; Packaging: Bag; Gender: Male; Type: Vertical; Rated Current: 7A; Value: 7A, 250 V (AC); Supplier 1 URL: N/A; Supplier 2 URL: N/A; Supplier 3 URL: N/A; LCSC Part #: N/A; Mount: THT; Operating Temperature Max: + 105 C; Operating Temperature Min: - 40 C; Package / Case: 8; Supplier 1: Mouser; Supplier 1 Part Number: N/A; Supplier 2: Digi-Key; Supplier 2 Part Number: N/A; Supplier 3: thegioiic; Supplier 3 Part Number: N/A
footprint 645008114822
pins: 1, 2, 3, 4, 5, 6, 7, 8

## 645008117322
designator P?, comment 7A, 250 V (AC)
WR-WTB THT Male Right Angled Locking Header, pitch 3.96mm, 8p; Manufacturer: Wurth Elektronik; Manufacturer Part Number: 645008117322; Pin Number: 8; Contact Resistance: 20mOhm; Withstanding Voltage: 1500VAC; Working Voltage: 250VAC; ComponentLink1Description: Datasheet; ComponentLink1URL: https://www.we-online.com/catalog/datasheet/645008117322.pdf; Pitch: 3.96mm; Packaging: Bag; Gender: Male; Type: Right Angled; Rated Current: 7A; Value: 7A, 250 V (AC); Supplier 1 URL: N/A; Supplier 2 URL: N/A; Supplier 3 URL: N/A; LCSC Part #: N/A; Mount: THT; Operating Temperature Max: + 105 C; Operating Temperature Min: - 40 C; Package / Case: 8; Supplier 1: Mouser; Supplier 1 Part Number: N/A; Supplier 2: Digi-Key; Supplier 2 Part Number: N/A; Supplier 3: thegioiic; Supplier 3 Part Number: N/A
footprint 645008117322
pins: 1, 2, 3, 4, 5, 6, 7, 8

## 645010114822
designator P?, comment 7A, 250 V (AC)
WR-WTB THT Male Vertical Locking Header, pitch 3.96mm, 10p; Manufacturer: Wurth Elektronik; Manufacturer Part Number: 645010114822; Pin Number: 10; Contact Resistance: 20mOhm; Withstanding Voltage: 1500VAC; Working Voltage: 250VAC; ComponentLink1Description: Datasheet; ComponentLink1URL: https://www.we-online.com/catalog/datasheet/645010114822.pdf; Pitch: 3.96mm; Packaging: Bag; Gender: Male; Type: Vertical; Rated Current: 7A; Value: 7A, 250 V (AC); Supplier 1 URL: N/A; Supplier 2 URL: N/A; Supplier 3 URL: N/A; LCSC Part #: N/A; Mount: THT; Operating Temperature Max: + 105 C; Operating Temperature Min: - 40 C; Package / Case: 10; Supplier 1: Mouser; Supplier 1 Part Number: N/A; Supplier 2: Digi-Key; Supplier 2 Part Number: N/A; Supplier 3: thegioiic; Supplier 3 Part Number: N/A
footprint 645010114822
pins: 1, 2, 3, 4, 5, 6, 7, 8, 9, 10

## 645010117322
designator P?, comment 7A, 250 V (AC)
WR-WTB THT Male Right Angled Locking Header, pitch 3.96mm, 10p; Manufacturer: Wurth Elektronik; Manufacturer Part Number: 645010117322; Pin Number: 10; Contact Resistance: 20mOhm; Withstanding Voltage: 1500VAC; Working Voltage: 250VAC; ComponentLink1Description: Datasheet; ComponentLink1URL: https://www.we-online.com/catalog/datasheet/645010117322.pdf; Pitch: 3.96mm; Packaging: Bag; Gender: Male; Type: Right Angled; Rated Current: 7A; Value: 7A, 250 V (AC); Supplier 1 URL: N/A; Supplier 2 URL: N/A; Supplier 3 URL: N/A; LCSC Part #: N/A; Mount: THT; Operating Temperature Max: + 105 C; Operating Temperature Min: - 40 C; Package / Case: 10; Supplier 1: Mouser; Supplier 1 Part Number: N/A; Supplier 2: Digi-Key; Supplier 2 Part Number: N/A; Supplier 3: thegioiic; Supplier 3 Part Number: N/A
footprint 645010117322
pins: 1, 2, 3, 4, 5, 6, 7, 8, 9, 10


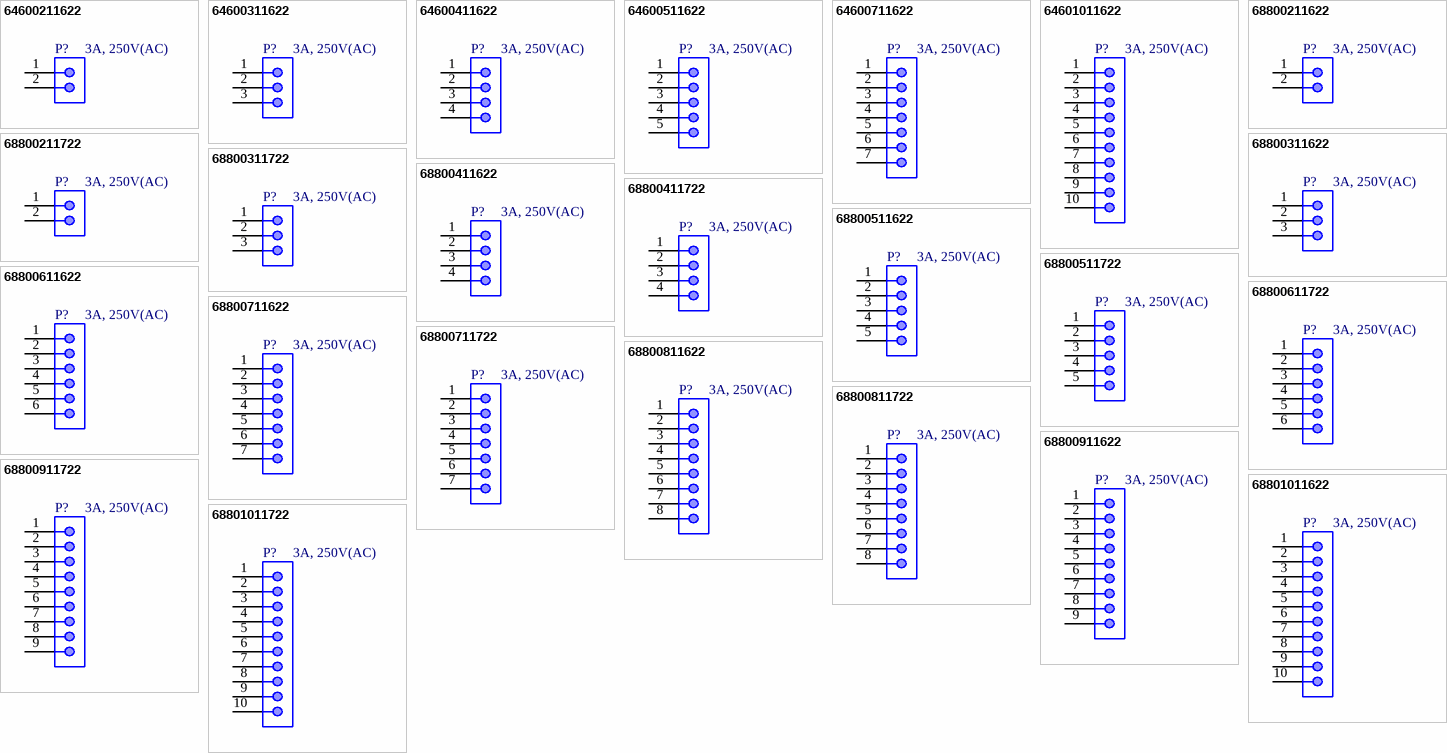
[diagram p5: symbols 64600211622 to 68801011722]

## 64600211622
designator P?, comment 3A, 250V(AC)
WR-WTB Male Vertical Shrouded Header, pitch 2.5mm, 2p; Manufacturer: Wurth Elektronik; Manufacturer Part Number: 64600211622; Pin Number: 2; Contact Resistance: 20mOhm; Withstanding Voltage: 1000VAC; Working Voltage: 250VAC; ComponentLink1Description: Datasheet; ComponentLink1URL: https://www.we-online.com/catalog/datasheet/64600211622.pdf; Pitch: 2.5mm; Packaging: Bag; Gender: Male; Type: Vertical; Rated Current: 3A; Supplier 1 URL: https://www.mouser.vn/ProductDetail/Wurth-Elektronik/64600211622?qs=ulEaXIWI0c%2FQU0TwvpLVZw%3D%3D; Supplier 2 URL: N/A; Supplier 3 URL: N/A; Value: 3A, 250V(AC); LCSC Part #: N/A; Mount: THT; Operating Temperature Max: + 105 C; Operating Temperature Min: - 40 C; Package / Case: 2; Supplier 1: Mouser; Supplier 1 Part Number: 710-64600211622; Supplier 2: Digi-Key; Supplier 2 Part Number: N/A; Supplier 3: thegioiic; Supplier 3 Part Number: N/A
footprint 64600211622
pins: 1, 2

## 64600311622
designator P?, comment 3A, 250V(AC)
WR-WTB Male Vertical Shrouded Header, pitch 2.5mm, 3p; Manufacturer: Wurth Elektronik; Manufacturer Part Number: 64600311622; Pin Number: 3; Contact Resistance: 20mOhm; Withstanding Voltage: 1000VAC; Working Voltage: 250VAC; ComponentLink1Description: Datasheet; ComponentLink1URL: https://www.we-online.com/catalog/datasheet/64600311622.pdf; Pitch: 2.5mm; Packaging: Bag; Gender: Male; Type: Vertical; Rated Current: 3A; Supplier 1 URL: N/A; Supplier 2 URL: N/A; Supplier 3 URL: N/A; Value: 3A, 250V(AC); LCSC Part #: N/A; Mount: THT; Operating Temperature Max: + 105 C; Operating Temperature Min: - 40 C; Package / Case: 3; Supplier 1: Mouser; Supplier 1 Part Number: N/A; Supplier 2: Digi-Key; Supplier 2 Part Number: N/A; Supplier 3: thegioiic; Supplier 3 Part Number: N/A
footprint 64600311622
pins: 1, 2, 3

## 64600411622
designator P?, comment 3A, 250V(AC)
WR-WTB Male Vertical Shrouded Header, pitch 2.5mm, 4p; Manufacturer: Wurth Elektronik; Manufacturer Part Number: 64600411622; Pin Number: 4; Contact Resistance: 20mOhm; Withstanding Voltage: 1000VAC; Working Voltage: 250VAC; ComponentLink1Description: Datasheet; ComponentLink1URL: https://www.we-online.com/catalog/datasheet/64600411622.pdf; Pitch: 2.5mm; Packaging: Bag; Gender: Male; Type: Vertical; Rated Current: 3A; Supplier 1 URL: https://www.mouser.vn/ProductDetail/Wurth-Elektronik/64600411622?qs=ulEaXIWI0c%2FOmlI5H1cDVQ%3D%3D; Supplier 2 URL: N/A; Supplier 3 URL: N/A; Value: 3A, 250V(AC); LCSC Part #: N/A; Mount: THT; Operating Temperature Max: + 105 C; Operating Temperature Min: - 40 C; Package / Case: 4; Supplier 1: Mouser; Supplier 1 Part Number: 710-64600411622; Supplier 2: Digi-Key; Supplier 2 Part Number: N/A; Supplier 3: thegioiic; Supplier 3 Part Number: N/A
footprint 64600411622
pins: 1, 2, 3, 4

## 64600511622
designator P?, comment 3A, 250V(AC)
WR-WTB Male Vertical Shrouded Header, pitch 2.5mm, 5p; Manufacturer: Wurth Elektronik; Manufacturer Part Number: 64600511622; Pin Number: 5; Contact Resistance: 20mOhm; Withstanding Voltage: 1000VAC; Working Voltage: 250VAC; ComponentLink1Description: Datasheet; ComponentLink1URL: https://www.we-online.com/catalog/datasheet/64600511622.pdf; Pitch: 2.5mm; Packaging: Bag; Gender: Male; Type: Vertical; Rated Current: 3A; Supplier 1 URL: N/A; Supplier 2 URL: N/A; Supplier 3 URL: N/A; Value: 3A, 250V(AC); LCSC Part #: N/A; Mount: THT; Operating Temperature Max: + 105 C; Operating Temperature Min: - 40 C; Package / Case: 5; Supplier 1: Mouser; Supplier 1 Part Number: N/A; Supplier 2: Digi-Key; Supplier 2 Part Number: N/A; Supplier 3: thegioiic; Supplier 3 Part Number: N/A
footprint 64600511622
pins: 1, 2, 3, 4, 5

## 64600711622
designator P?, comment 3A, 250V(AC)
WR-WTB Male Vertical Shrouded Header, pitch 2.5mm, 7p; Manufacturer: Wurth Elektronik; Manufacturer Part Number: 64600711622; Pin Number: 7; Contact Resistance: 20mOhm; Withstanding Voltage: 1000VAC; Working Voltage: 250VAC; ComponentLink1Description: Datasheet; ComponentLink1URL: https://www.we-online.com/catalog/datasheet/64600711622.pdf; Pitch: 2.5mm; Packaging: Bag; Gender: Male; Type: Vertical; Rated Current: 3A; Supplier 1 URL: https://www.mouser.vn/ProductDetail/Wurth-Elektronik/64600711622?qs=ylEgnKlAG2aCoZ%2FuUXn57g%3D%3D; Supplier 2 URL: N/A; Supplier 3 URL: N/A; Value: 3A, 250V(AC); LCSC Part #: N/A; Mount: THT; Operating Temperature Max: + 105 C; Operating Temperature Min: - 40 C; Package / Case: 7; Supplier 1: Mouser; Supplier 1 Part Number: 710-64600711622; Supplier 2: Digi-Key; Supplier 2 Part Number: N/A; Supplier 3: thegioiic; Supplier 3 Part Number: N/A
footprint 64600711622
pins: 1, 2, 3, 4, 5, 6, 7

## 64601011622
designator P?, comment 3A, 250V(AC)
WR-WTB Male Vertical Shrouded Header, pitch 2.5mm, 10p; Manufacturer: Wurth Elektronik; Manufacturer Part Number: 64601011622; Pin Number: 10; Contact Resistance: 20mOhm; Withstanding Voltage: 1000VAC; Working Voltage: 250VAC; ComponentLink1Description: Datasheet; ComponentLink1URL: https://www.we-online.com/catalog/datasheet/64601011622.pdf; Pitch: 2.5mm; Packaging: Bag; Gender: Male; Type: Vertical; Rated Current: 3A; Supplier 1 URL: N/A; Supplier 2 URL: N/A; Supplier 3 URL: N/A; Value: 3A, 250V(AC); LCSC Part #: N/A; Mount: THT; Operating Temperature Max: + 105 C; Operating Temperature Min: - 40 C; Package / Case: 10; Supplier 1: Mouser; Supplier 1 Part Number: N/A; Supplier 2: Digi-Key; Supplier 2 Part Number: N/A; Supplier 3: thegioiic; Supplier 3 Part Number: N/A
footprint 64601011622
pins: 1, 2, 3, 4, 5, 6, 7, 8, 9, 10

## 68800211622
designator P?, comment 3A, 250V(AC)
WR-WTB “J” Type THT Vertical Male Shrouded Header, pitch 2.5mm, 2p; Manufacturer: Wurth Elektronik; Manufacturer Part Number: 68800211622; Pin Number: 2; Contact Resistance: 20mOhm; Withstanding Voltage: 800VAC; Working Voltage: 250VAC; ComponentLink1Description: Datasheet; ComponentLink1URL: https://www.we-online.com/catalog/datasheet/68800211622.pdf; Pitch: 2.5mm; Packaging: Bag; Gender: Male; Type: Vertical; Rated Current: 3A; Supplier 1 URL: https://www.mouser.vn/ProductDetail/Wurth-Elektronik/68800211622?qs=W0yvOO0ixfFEaDSIrO93qQ%3D%3D; Supplier 2 URL: N/A; Supplier 3 URL: N/A; Value: 3A, 250V(AC); LCSC Part #: N/A; Mount: THT; Operating Temperature Max: + 85 C; Operating Temperature Min: - 25 C; Package / Case: 2; Supplier 1: Mouser; Supplier 1 Part Number: 710-68800211622; Supplier 2: Digi-Key; Supplier 2 Part Number: N/A; Supplier 3: thegioiic; Supplier 3 Part Number: N/A
footprint 68800211622
pins: 1, 2

## 68800211722
designator P?, comment 3A, 250V(AC)
WR-WTB “J” Type THT Male Horizontal Shrouded Header, pitch 2.5mm, 2p; Manufacturer: Wurth Elektronik; Manufacturer Part Number: 68800211722; Pin Number: 2; Contact Resistance: 20mOhm; Withstanding Voltage: 800VAC; Working Voltage: 250VAC; ComponentLink1Description: Datasheet; ComponentLink1URL: https://www.we-online.com/catalog/datasheet/68800211722.pdf; Pitch: 2.5mm; Packaging: Bag; Gender: Male; Type: Horizontal; Rated Current: 3A; Supplier 1 URL: N/A; Supplier 2 URL: N/A; Supplier 3 URL: N/A; Value: 3A, 250V(AC); LCSC Part #: N/A; Mount: THT; Operating Temperature Max: + 85 C; Operating Temperature Min: - 25 C; Package / Case: 2; Supplier 1: Mouser; Supplier 1 Part Number: N/A; Supplier 2: Digi-Key; Supplier 2 Part Number: N/A; Supplier 3: thegioiic; Supplier 3 Part Number: N/A
footprint 68800211722
pins: 1, 2

## 68800311622
designator P?, comment 3A, 250V(AC)
WR-WTB “J” Type THT Vertical Male Shrouded Header, pitch 2.5mm, 3p; Manufacturer: Wurth Elektronik; Manufacturer Part Number: 68800311622; Pin Number: 3; Contact Resistance: 20mOhm; Withstanding Voltage: 800VAC; Working Voltage: 250VAC; ComponentLink1Description: Datasheet; ComponentLink1URL: https://www.we-online.com/catalog/datasheet/68800311622.pdf; Pitch: 2.5mm; Packaging: Bag; Gender: Male; Type: Vertical; Rated Current: 3A; Supplier 1 URL: N/A; Supplier 2 URL: N/A; Supplier 3 URL: N/A; Value: 3A, 250V(AC); LCSC Part #: N/A; Mount: THT; Operating Temperature Max: + 85 C; Operating Temperature Min: - 25 C; Package / Case: 3; Supplier 1: Mouser; Supplier 1 Part Number: N/A; Supplier 2: Digi-Key; Supplier 2 Part Number: N/A; Supplier 3: thegioiic; Supplier 3 Part Number: N/A
footprint 68800311622
pins: 1, 2, 3

## 68800311722
designator P?, comment 3A, 250V(AC)
WR-WTB “J” Type THT Male Horizontal Shrouded Header, pitch 2.5mm, 3p; Manufacturer: Wurth Elektronik; Manufacturer Part Number: 68800311722; Pin Number: 3; Contact Resistance: 20mOhm; Withstanding Voltage: 800VAC; Working Voltage: 250VAC; ComponentLink1Description: Datasheet; ComponentLink1URL: https://www.we-online.com/catalog/datasheet/68800311722.pdf; Pitch: 2.5mm; Packaging: Bag; Gender: Male; Type: Horizontal; Rated Current: 3A; Supplier 1 URL: N/A; Supplier 2 URL: N/A; Supplier 3 URL: N/A; Value: 3A, 250V(AC); LCSC Part #: N/A; Mount: THT; Operating Temperature Max: + 85 C; Operating Temperature Min: - 25 C; Package / Case: 3; Supplier 1: Mouser; Supplier 1 Part Number: N/A; Supplier 2: Digi-Key; Supplier 2 Part Number: N/A; Supplier 3: thegioiic; Supplier 3 Part Number: N/A
footprint 68800311722
pins: 1, 2, 3

## 68800411622
designator P?, comment 3A, 250V(AC)
WR-WTB “J” Type THT Vertical Male Shrouded Header, pitch 2.5mm, 4p; Manufacturer: Wurth Elektronik; Manufacturer Part Number: 68800411622; Pin Number: 4; Contact Resistance: 20mOhm; Withstanding Voltage: 800VAC; Working Voltage: 250VAC; ComponentLink1Description: Datasheet; ComponentLink1URL: https://www.we-online.com/catalog/datasheet/68800411622.pdf; Pitch: 2.5mm; Packaging: Bag; Gender: Male; Type: Vertical; Rated Current: 3A; Supplier 1 URL: N/A; Supplier 2 URL: N/A; Supplier 3 URL: N/A; Value: 3A, 250V(AC); LCSC Part #: N/A; Mount: THT; Operating Temperature Max: + 85 C; Operating Temperature Min: - 25 C; Package / Case: 4; Supplier 1: Mouser; Supplier 1 Part Number: N/A; Supplier 2: Digi-Key; Supplier 2 Part Number: N/A; Supplier 3: thegioiic; Supplier 3 Part Number: N/A
footprint 68800411622
pins: 1, 2, 3, 4

## 68800411722
designator P?, comment 3A, 250V(AC)
WR-WTB “J” Type THT Male Horizontal Shrouded Header, pitch 2.5mm, 4p; Manufacturer: Wurth Elektronik; Manufacturer Part Number: 68800411722; Pin Number: 4; Contact Resistance: 20mOhm; Withstanding Voltage: 800VAC; Working Voltage: 250VAC; ComponentLink1Description: Datasheet; ComponentLink1URL: https://www.we-online.com/catalog/datasheet/68800411722.pdf; Pitch: 2.5mm; Packaging: Bag; Gender: Male; Type: Horizontal; Rated Current: 3A; Supplier 1 URL: N/A; Supplier 2 URL: N/A; Supplier 3 URL: N/A; Value: 3A, 250V(AC); LCSC Part #: N/A; Mount: THT; Operating Temperature Max: + 85 C; Operating Temperature Min: - 25 C; Package / Case: 4; Supplier 1: Mouser; Supplier 1 Part Number: N/A; Supplier 2: Digi-Key; Supplier 2 Part Number: N/A; Supplier 3: thegioiic; Supplier 3 Part Number: N/A
footprint 68800411722
pins: 1, 2, 3, 4

## 68800511622
designator P?, comment 3A, 250V(AC)
WR-WTB “J” Type THT Vertical Male Shrouded Header, pitch 2.5mm, 5p; Manufacturer: Wurth Elektronik; Manufacturer Part Number: 68800511622; Pin Number: 5; Contact Resistance: 20mOhm; Withstanding Voltage: 800VAC; Working Voltage: 250VAC; ComponentLink1Description: Datasheet; ComponentLink1URL: https://www.we-online.com/catalog/datasheet/68800511622.pdf; Pitch: 2.5mm; Packaging: Bag; Gender: Male; Type: Vertical; Rated Current: 3A; Supplier 1 URL: N/A; Supplier 2 URL: N/A; Supplier 3 URL: N/A; Value: 3A, 250V(AC); LCSC Part #: N/A; Mount: THT; Operating Temperature Max: + 85 C; Operating Temperature Min: - 25 C; Package / Case: 5; Supplier 1: Mouser; Supplier 1 Part Number: N/A; Supplier 2: Digi-Key; Supplier 2 Part Number: N/A; Supplier 3: thegioiic; Supplier 3 Part Number: N/A
footprint 68800511622
pins: 1, 2, 3, 4, 5

## 68800511722
designator P?, comment 3A, 250V(AC)
WR-WTB “J” Type THT Male Horizontal Shrouded Header, pitch 2.5mm, 5p; Manufacturer: Wurth Elektronik; Manufacturer Part Number: 68800511722; Pin Number: 5; Contact Resistance: 20mOhm; Withstanding Voltage: 800VAC; Working Voltage: 250VAC; ComponentLink1Description: Datasheet; ComponentLink1URL: https://www.we-online.com/catalog/datasheet/68800511722.pdf; Pitch: 2.5mm; Packaging: Bag; Gender: Male; Type: Horizontal; Rated Current: 3A; Supplier 1 URL: N/A; Supplier 2 URL: N/A; Supplier 3 URL: N/A; Value: 3A, 250V(AC); LCSC Part #: N/A; Mount: THT; Operating Temperature Max: + 85 C; Operating Temperature Min: - 25 C; Package / Case: 5; Supplier 1: Mouser; Supplier 1 Part Number: N/A; Supplier 2: Digi-Key; Supplier 2 Part Number: N/A; Supplier 3: thegioiic; Supplier 3 Part Number: N/A
footprint 68800511722
pins: 1, 2, 3, 4, 5